# Altium footprint library Footprint-Lib-PhilsLab.PcbLib: 544 footprints (part 29 of 34)
Each footprint in its own frame and in the unit in brackets; x right, y up, seen from the top. Pads: shape width x height; smd on the part's side, far side on the other; paste and mask are expansions set on the pad; w line width, h text height; cw(c..) or ccw(c..) is an arc to the next point about the centre after c.
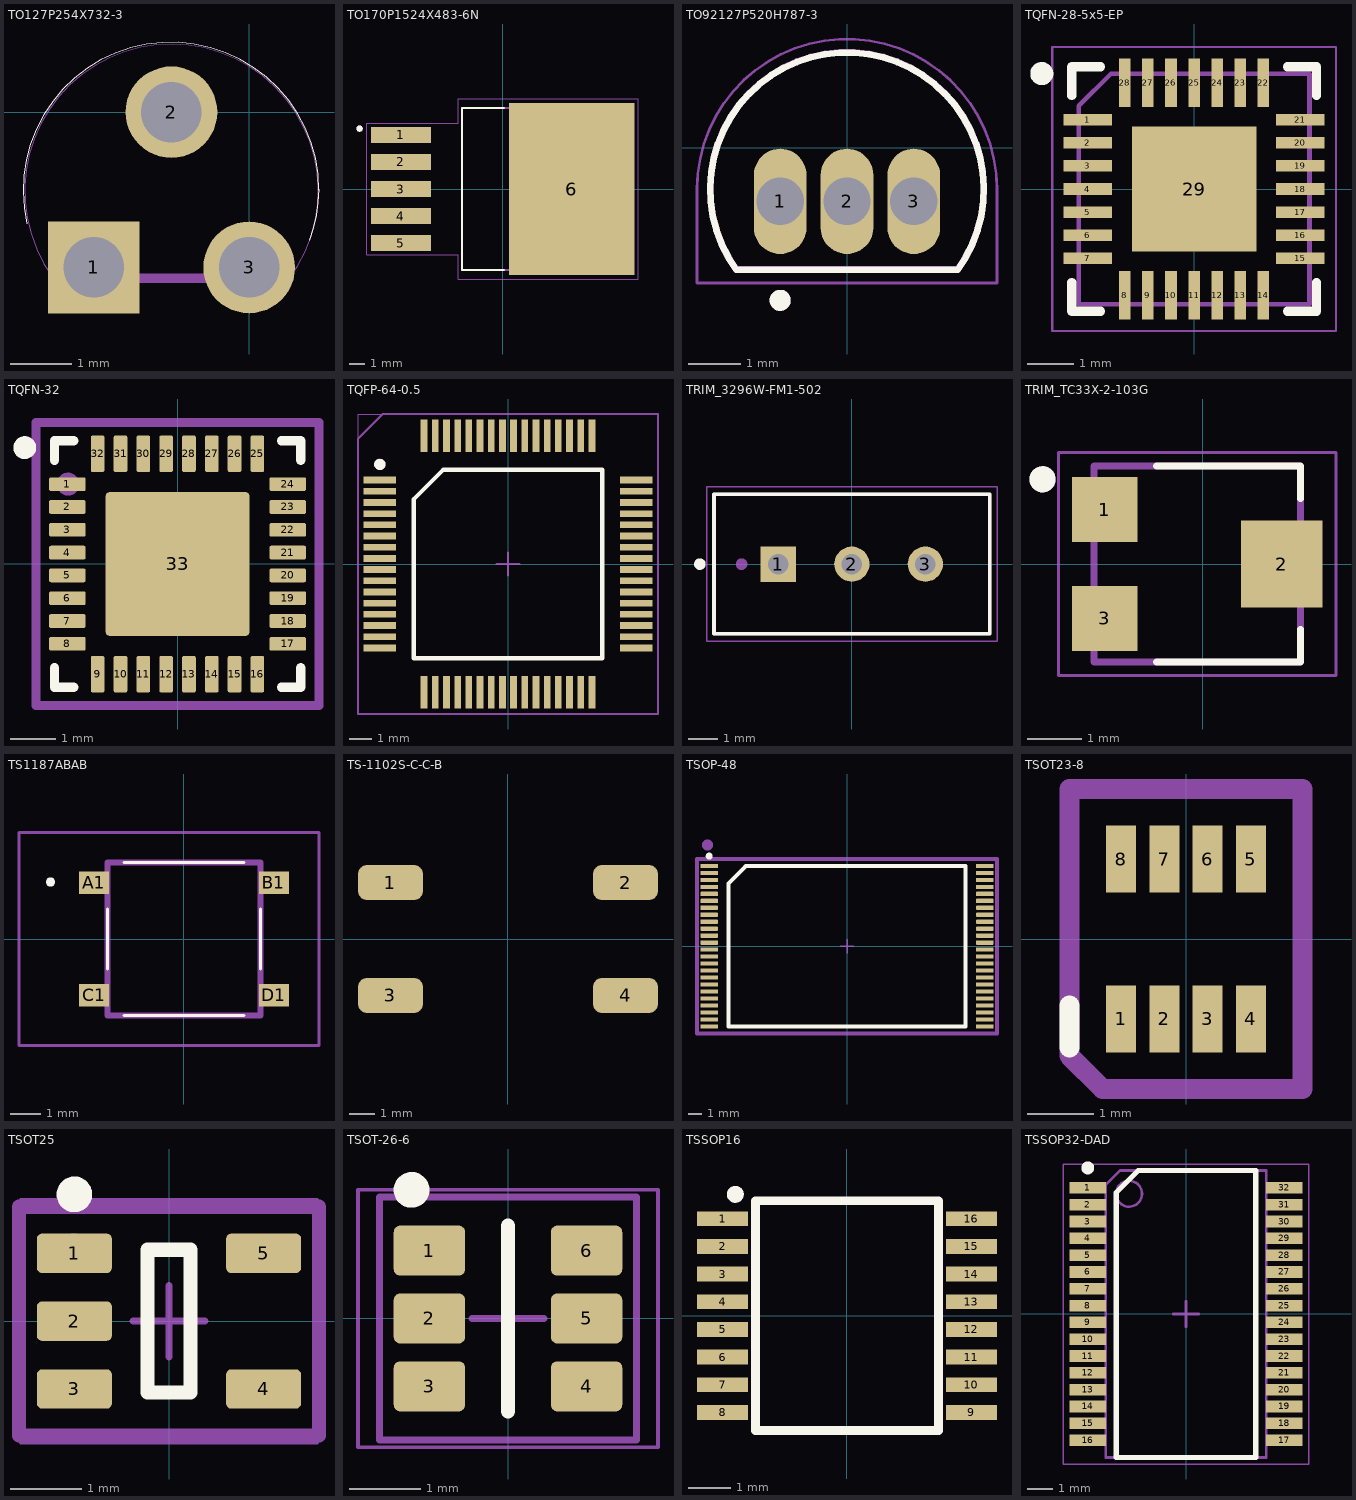
[diagram p28: the footprints below, top view; thin cyan lines are the x and y axes]

## TO127P254X732-3 [mil]
pads (3):
  rect 59x59 / inner round 59 / far side rect 59x59 hole 39: 1(-100,-100)
  round 59 hole 39: 2(-50,0) 3(0,-100)
Top Overlay:
  lines w0: -143.07,-71.72 cw(c-50.25,-50.29) 45,-50.29 ; 39.18,-82.52 ccw(c-51.58,-49.49) 45,-49.49
Mechanical 13:
  lines w0: -126.49,-106.33 cw(c-50,-50.76) 25.51,-107.66
  lines w6: -126,-107 26,-107
3D body "step_temp.STEP": height 181.1, standoff -492.13, extent -147.64,-129.92 68.11,11.81

## TO170P1524X483-6N [mm]
height 4.83
pads (6):
  rect 3.79x0.99 smd: 1(-6.4,3.4) 2(-6.4,1.7) 3(-6.4,0) 4(-6.4,-1.7) 5(-6.4,-3.4)
  rect 7.88x10.84 smd paste-6: 6(4.35,0)
Top Overlay:
  circle w0.2: c-9,3.8 r0.1
  lines w0.127: 0.09,-5.08 -2.553,-5.08 -2.553,5.08 0.09,5.08
Top Paste:
  region: 7.74,-5.15 6.22,-5.15 6.22,-3.9 7.74,-3.9
  region: 2.48,-5.15 0.96,-5.15 0.96,-3.9 2.48,-3.9
  region: 5.11,-5.15 3.59,-5.15 3.59,-3.9 5.11,-3.9
  region: 7.74,-3.34 6.22,-3.34 6.22,-2.09 7.74,-2.09
  region: 2.48,-3.34 0.96,-3.34 0.96,-2.09 2.48,-2.09
  region: 5.11,-3.34 3.59,-3.34 3.59,-2.09 5.11,-2.09
  region: 7.74,-1.53 6.22,-1.53 6.22,-0.28 7.74,-0.28
  region: 2.48,-1.53 0.96,-1.53 0.96,-0.28 2.48,-0.28
  region: 5.11,-1.53 3.59,-1.53 3.59,-0.28 5.11,-0.28
  region: 7.74,3.9 6.22,3.9 6.22,5.15 7.74,5.15
  region: 2.48,3.9 0.96,3.9 0.96,5.15 2.48,5.15
  region: 5.11,3.9 3.59,3.9 3.59,5.15 5.11,5.15
  region: 7.74,2.09 6.22,2.09 6.22,3.34 7.74,3.34
  region: 2.48,2.09 0.96,2.09 0.96,3.34 2.48,3.34
  region: 5.11,2.09 3.59,2.09 3.59,3.34 5.11,3.34
  region: 7.74,0.28 6.22,0.28 6.22,1.53 7.74,1.53
  region: 2.48,0.28 0.96,0.28 0.96,1.53 2.48,1.53
  region: 5.11,0.28 3.59,0.28 3.59,1.53 5.11,1.53
Mechanical 13:
  circle w0.2: c-9,3.8 r0.1
  lines w0.127: -2.553,-5.08 -2.553,5.08 6.368,5.08 6.368,-5.08 -2.553,-5.08
Mechanical 15:
  lines w0.05: -8.545,-4.145 -2.803,-4.145 -2.803,-5.67 8.54,-5.67 8.54,5.67 -2.803,5.67 -2.803,4.145 -8.545,4.145 -8.545,-4.145
3D body "step_temp.STEP": height 4.65, standoff -0.15, extent -7.175,-5.08 7.175,5.08

## TO92127P520H787-3 [mm]
height 7.87
pads (3):
  oval 1x2 hole 0.9: 1(-1.27,-1.02) 2(0,-1.02) 3(1.27,-1.02)
Top Overlay:
  circle w0.2: c-1.27,-2.9 r0.1
  lines w0.127: -2.103,-2.318 cw(c0,-0.79) 2.103,-2.318 ; -2.102,-2.32 2.102,-2.32
Mechanical 13:
  circle w0.2: c-1.27,-2.9 r0.1
  lines w0.127: -2.103,-2.313 cw(c0,-0.785) 2.103,-2.313 ; -2.102,-2.315 2.102,-2.315
Mechanical 15:
  lines w0.05: -2.85,-2.57 2.85,-2.57 2.85,-0.785 ccw(c0,-0.785) -2.85,-0.785 -2.85,-2.57
3D body "step_temp.STEP": height 7.74, standoff -1.66, extent -2.385,-2.282 2.413,1.651

## TQFN-28-5x5-EP [mm] "QFN, 28-Leads, Body 5.00x5.00mm, Pitch 0.50mm, Thermal Pad 2.70x2.70mm, IPC Medium Density"
height 0.8
pads (29):
  rect 1.05x0.25 smd mask+0.15: 1(-2.3,1.5) 2(-2.3,1) 3(-2.3,0.5) 4(-2.3,0) 5(-2.3,-0.5) 6(-2.3,-1) 7(-2.3,-1.5) 15(2.3,-1.5) 16(2.3,-1) 17(2.3,-0.5) 18(2.3,0) 19(2.3,0.5) 20(2.3,1) 21(2.3,1.5)
  rect 0.25x1.05 smd mask+0.15: 8(-1.5,-2.3) 9(-1,-2.3) 10(-0.5,-2.3) 11(0,-2.3) 12(0.5,-2.3) 13(1,-2.3) 14(1.5,-2.3) 22(1.5,2.3) 23(1,2.3) 24(0.5,2.3) 25(0,2.3) 26(-0.5,2.3) 27(-1,2.3) 28(-1.5,2.3)
  rect 2.7x2.7 smd paste+0 mask+0.05: 29(0,0)
Top Overlay:
  circle w0.25: c-3.3,2.5 r0.125
  lines w0.2: -2.65,-2.025 -2.65,-2.65 -2.025,-2.65 ; -2.65,2.025 -2.65,2.65 -2.025,2.65 ; 2.025,-2.65 2.65,-2.65 2.65,-2.025 ; 2.025,2.65 2.65,2.65 2.65,2.025
Mechanical 13:
  lines w0.1: -2.5,-2.5 -2.5,1.8 -1.8,2.5 2.5,2.5 2.5,-2.5 -2.5,-2.5
  text "'.Designator'" at -5.815,-0.9 h1
Mechanical 15:
  lines w0.05: -3.075,-3.075 3.075,-3.075 3.075,3.075 -3.075,3.075 -3.075,-3.075
  lines w0.1: -0.5,0 0.5,0 ; 0,-0.5 0,0.5
3D body "TQFN-28-5x5-EP.step": height 0.8, standoff 0, extent -2.55,-2.55 2.55,2.55

## TQFN-32 [mm]
height 0.8
pads (33):
  rrect25% 0.8x0.3 smd mask+0.04: 1(-2.415,1.75) 8(-2.415,-1.75) 17(2.415,-1.75) 24(2.415,1.75)
  rrect25% 0.8x0.3 smd mask+0.05: 2(-2.415,1.25) 3(-2.415,0.75) 4(-2.415,0.25) 5(-2.415,-0.25) 6(-2.415,-0.75) 7(-2.415,-1.25) 18(2.415,-1.25) 19(2.415,-0.75) 20(2.415,-0.25) 21(2.415,0.25) 22(2.415,0.75) 23(2.415,1.25)
  rrect25% 0.3x0.8 smd mask+0.04: 9(-1.75,-2.415) 16(1.75,-2.415) 25(1.75,2.415) 32(-1.75,2.415)
  rrect25% 0.3x0.8 smd mask+0.05: 10(-1.25,-2.415) 11(-0.75,-2.415) 12(-0.25,-2.415) 13(0.25,-2.415) 14(0.75,-2.415) 15(1.25,-2.415) 26(1.25,2.415) 27(0.75,2.415) 28(0.25,2.415) 29(-0.25,2.415) 30(-0.75,2.415) 31(-1.25,2.415)
  rrect5% 3.15x3.15 smd: 33(0,0)
Top Overlay:
  circle w0.25: c-3.35,2.55 r0.125
  lines w0.2: -2.7,-2.275 -2.7,-2.7 -2.275,-2.7 ; -2.7,2.275 -2.7,2.7 -2.275,2.7 ; 2.275,-2.7 2.7,-2.7 2.7,-2.275 ; 2.275,2.7 2.7,2.7 2.7,2.275
Mechanical 13:
  circle w0.3: c-2.4,1.75 r0.1
  lines w0.2: -3.1,-3.1 3.1,-3.1 3.1,3.1 -3.1,3.1 -3.1,-3.1
  text "'.Designator'" at -5.665,-0.417 h1
Mechanical 15:
  lines w0.05: -3.1,-3.1 3.1,-3.1 3.1,3.1 -3.1,3.1 -3.1,-3.1
  lines w0.1: -0.5,0 0.5,0 ; 0,-0.5 0,0.5
3D body "TQFN-32.step": height 0.8, standoff 0, extent -2.551,-2.551 2.551,2.551

## TQFP-64-0.5 [mm] "TSQFP, 64-Leads, Body 10,00x10,00mm, Pitch 0,50mm, IPC Medium Density"
height 1.6
pads (64):
  rect 1.45x0.3 smd: 1(-5.725,3.75) 2(-5.725,3.25) 3(-5.725,2.75) 4(-5.725,2.25) 5(-5.725,1.75) 6(-5.725,1.25) 7(-5.725,0.75) 8(-5.725,0.25) 9(-5.725,-0.25) 10(-5.725,-0.75) 11(-5.725,-1.25) 12(-5.725,-1.75) 13(-5.725,-2.25) 14(-5.725,-2.75) 15(-5.725,-3.25) 16(-5.725,-3.75) 33(5.725,-3.75) 34(5.725,-3.25) 35(5.725,-2.75) 36(5.725,-2.25) 37(5.725,-1.75) 38(5.725,-1.25) 39(5.725,-0.75) 40(5.725,-0.25) 41(5.725,0.25) 42(5.725,0.75) 43(5.725,1.25) 44(5.725,1.75) 45(5.725,2.25) 46(5.725,2.75) 47(5.725,3.25) 48(5.725,3.75)
  rect 0.3x1.45 smd: 17(-3.75,-5.725) 18(-3.25,-5.725) 19(-2.75,-5.725) 20(-2.25,-5.725) 21(-1.75,-5.725) 22(-1.25,-5.725) 23(-0.75,-5.725) 24(-0.25,-5.725) 25(0.25,-5.725) 26(0.75,-5.725) 27(1.25,-5.725) 28(1.75,-5.725) 29(2.25,-5.725) 30(2.75,-5.725) 31(3.25,-5.725) 32(3.75,-5.725) 49(3.75,5.725) 50(3.25,5.725) 51(2.75,5.725) 52(2.25,5.725) 53(1.75,5.725) 54(1.25,5.725) 55(0.75,5.725) 56(0.25,5.725) 57(-0.25,5.725) 58(-0.75,5.725) 59(-1.25,5.725) 60(-1.75,5.725) 61(-2.25,5.725) 62(-2.75,5.725) 63(-3.25,5.725) 64(-3.75,5.725)
Top Overlay:
  circle w0.25: c-5.725,4.45 r0.125
  lines w0.2: -4.2,-4.2 -4.2,2.9 -2.9,4.2 4.2,4.2 4.2,-4.2 -4.2,-4.2
Mechanical 13:
  circle w0.1: c-5.724,4.454 r0.2
  lines w0.1: -6.7,-6.7 -6.7,5.6 -5.6,6.7 6.7,6.7 6.7,-6.7 -6.7,-6.7
  text "'.Designator'" at -5.815,-0.9 h1
Mechanical 15:
  lines w0.05: -6.7,-6.7 -6.7,6.7 6.7,6.7 6.7,-6.7 -6.7,-6.7
  lines w0.1: -0.5,0 0.5,0 ; 0,-0.5 0,0.5
3D body "TQFP-64-0.5.step": height 1.6, standoff 0, extent -6,-6 6,6

## TRIM_3296W-FM1-502 [mm]
pads (3):
  rect 1.218x1.218 hole 0.71: 1(-2.54,0)
  round 1.218 hole 0.71: 2(0,0) 3(2.54,0)
Top Overlay:
  circle w0.2: c-5.25,0 r0.1
  lines w0.127: -4.765,-2.41 4.765,-2.41 4.765,2.42 -4.765,2.42 -4.765,-2.41
Mechanical 13:
  circle w0.2: c-3.81,0 r0.1
  lines w0.127: -4.765,-2.41 -4.765,2.42 4.765,2.42 4.765,-2.41 -4.765,-2.41
Mechanical 15:
  lines w0.05: -5.015,-2.66 -5.015,2.67 5.015,2.67 5.015,-2.66 -5.015,-2.66
3D body "3296W-FM1-502.STEP": height 11.55, standoff -7.72, extent -4.765,-2.41 4.765,2.42

## TRIM_TC33X-2-103G [mm]
pads (3):
  rect 1.2x1.2 smd: 1(-1.8,1) 3(-1.8,-1)
  rect 1.5x1.6 smd: 2(1.45,0)
Top Overlay:
  circle w0.24: c-2.946,1.558 r0.12
  lines w0.127: -0.85,-1.8 1.8,-1.8 1.8,-1.2 ; -0.85,1.8 1.8,1.8 1.8,1.2
Mechanical 13:
  circle w0.24: c-2.946,1.558 r0.12
  lines w0.127: -2,-1.8 1.8,-1.8 1.8,1.8 -2,1.8 -2,-1.8
Mechanical 15:
  lines w0.05: -2.65,-2.05 2.45,-2.05 2.45,2.05 -2.65,2.05 -2.65,-2.05
3D body "step_temp.STEP": height 1.1, standoff -0.1, extent -1.5,-1.9 1.5,1.9

## TS1187ABAB [mm]
pads (4):
  rect 1x0.75 smd: A1(-3,1.875) B1(3,1.875) C1(-3,-1.875) D1(3,-1.875)
Top Overlay:
  lines w0.1: -2.55,-1 -2.55,1 ; -2,-2.55 2,-2.55 ; -2,2.55 2,2.55 ; 2.55,-1 2.55,1
  lines w0.2: -4.5,1.9 ccw(c-4.45,1.9) -4.4,1.9 ; -4.5,1.9 cw(c-4.45,1.9) -4.4,1.9 ; -4.5,1.9 ccw(c-4.45,1.9) -4.4,1.9
Mechanical 13:
  lines w0.2: -2.55,-2.55 2.55,-2.55 2.55,2.55 -2.55,2.55 -2.55,-2.55
Mechanical 15:
  lines w0.1: -5.5,-3.55 4.5,-3.55 4.5,3.55 -5.5,3.55 -5.5,-3.55
3D body "TS-1187A-B-A-B.stp": height 1.5, standoff 0, extent -3.2,-2.55 3.3,2.55

## TS-1102S-C-C-B [mm] "None Without bracket 50mA 6mm 300,000 times 260gf 12V 6mm 5mm Round Button Standing paste SPST SMD Tactile Switches ROHS"
pads (4):
  rrect50% 2.6x1.4 smd: 1(-4.705,2.26) 2(4.705,2.26) 3(-4.705,-2.26) 4(4.705,-2.26)
3D body "2-1437565-7.step": height 4.28, standoff -0.1, extent -5.02,-3 4.98,3

## TSOP-48 [mm]
height 1.2
pads (48):
  rrect25% 1.25x0.3 smd mask+0.12: 1(-9.875,5.75) 2(-9.875,5.25) 3(-9.875,4.75) 4(-9.875,4.25) 5(-9.875,3.75) 6(-9.875,3.25) 7(-9.875,2.75) 8(-9.875,2.25) 9(-9.875,1.75) 10(-9.875,1.25) 11(-9.875,0.75) 12(-9.875,0.25) 13(-9.875,-0.25) 14(-9.875,-0.75) 15(-9.875,-1.25) 16(-9.875,-1.75) 17(-9.875,-2.25) 18(-9.875,-2.75) 19(-9.875,-3.25) 20(-9.875,-3.75) 21(-9.875,-4.25) 22(-9.875,-4.75) 23(-9.875,-5.25) 24(-9.875,-5.75) 25(9.875,-5.75) 26(9.875,-5.25) 27(9.875,-4.75) 28(9.875,-4.25) 29(9.875,-3.75) 30(9.875,-3.25) 31(9.875,-2.75) 32(9.875,-2.25) 33(9.875,-1.75) 34(9.875,-1.25) 35(9.875,-0.75) 36(9.875,-0.25) 37(9.875,0.25) 38(9.875,0.75) 39(9.875,1.25) 40(9.875,1.75) 41(9.875,2.25) 42(9.875,2.75) 43(9.875,3.25) 44(9.875,3.75) 45(9.875,4.25) 46(9.875,4.75) 47(9.875,5.25) 48(9.875,5.75)
Top Overlay:
  circle w0.25: c-9.875,6.45 r0.125
  lines w0.3: -8.5,-5.75 8.5,-5.75 8.5,5.75 -7.25,5.75 -8.5,4.5 -8.5,-5.75
Mechanical 13:
  circle w0.5: c-10,7.25 r0.15
  lines w0.3: -10.75,-6.25 10.75,-6.25 10.75,6.25 -10.75,6.25 -10.75,-6.25
  text "'.Designator'" at -5.815,-0.9 h1
Mechanical 15:
  lines w0.05: -10.725,-6.3 10.725,-6.3 10.725,6.3 -10.725,6.3 -10.725,-6.3
  lines w0.1: -0.5,0 0.5,0 ; 0,-0.5 0,0.5
3D body "TSOP-48.step": height 1.2, standoff 0, extent -10,-6.05 10,6.05

## TSOT23-8 [mm]
pads (8):
  rect 0.45x1 smd: 1(-0.975,-1.2) 2(-0.325,-1.2) 3(0.325,-1.2) 4(0.975,-1.2) 5(0.975,1.2) 6(0.325,1.2) 7(-0.325,1.2) 8(-0.975,1.2)
Top Overlay:
  lines w0.3: -1.75,-1.628 -1.75,-1
Mechanical 13:
  lines w0.3: -1.75,-1.75 -1.25,-2.25 1.75,-2.25 1.75,2.25 -1.75,2.25 -1.75,0 -1.75,-1.75
  text "'.Designator'" at -5.84,-0.925 h1
3D body "TSOT-23-8.STEP": height 1.01, standoff 0.01, extent -1.45,-1.4 1.45,1.4

## TSOT25 [mm] "SOT23, 5-Leads, Body 2.90x2.80mm, Pitch 0.95mm, IPC Medium Density"
height 1
pads (5):
  rrect25% 1.05x0.55 smd: 1(-1.325,0.95) 2(-1.325,0) 3(-1.325,-0.95) 4(1.325,-0.95) 5(1.325,0.95)
Top Overlay:
  circle w0.25: c-1.325,1.775 r0.125
  lines w0.2: -0.3,-1 0.3,-1 0.3,1 -0.3,1 -0.3,-1
Mechanical 13:
  circle w0.25: c-1.325,0.975 r0.125
  lines w0.2: -2.1,-1.6 2.1,-1.6 2.1,1.6 -2.1,1.6 -2.1,-1.6
  text "'.Designator'" at -5.815,-0.9 h1
Mechanical 15:
  lines w0.05: -2.075,-1.7 -2.075,1.7 2.075,1.7 2.075,-1.7 -2.075,-1.7
  lines w0.1: -0.5,0 0.5,0 ; 0,-0.5 0,0.5
3D body "TSOT25.step": height 1, standoff 0, extent -1.4,-1.45 1.4,1.45

## TSOT-26-6 [mm] "TSOP, 6-Leads, Body 2.90x1.60mm, Pitch 0.95mm, IPC Medium Density"
height 1
pads (6):
  rrect25% 1x0.7 smd: 1(-1.1,0.95) 2(-1.1,0) 3(-1.1,-0.95) 4(1.1,-0.95) 5(1.1,0) 6(1.1,0.95)
Top Overlay:
  circle w0.25: c-1.35,1.8 r0.125
  lines w0.2: 0,-1.3 0,1.3
Mechanical 13:
  lines w0.1: -1.8,-1.7 -1.8,1.7 1.8,1.7 1.8,-1.7 -1.8,-1.7
  text ".Designator" at -4.998,-0.333 h1
Mechanical 15:
  lines w0.05: -2.1,-1.8 -2.1,1.8 2.1,1.8 2.1,-1.8 -2.1,-1.8
  lines w0.1: -0.5,0 0.5,0 ; 0,-0.5 0,0.5
3D body "TSOT-26-6.step": height 1, standoff 0, extent -1.4,-1.55 1.4,1.55

## TSSOP16 [mm]
pads (16):
  rect 1.2x0.35 smd: 1(-2.925,2.275) 2(-2.925,1.625) 3(-2.925,0.975) 4(-2.925,0.325) 5(-2.925,-0.325) 6(-2.925,-0.975) 7(-2.925,-1.625) 8(-2.925,-2.275) 9(2.925,-2.275) 10(2.925,-1.625) 11(2.925,-0.975) 12(2.925,-0.325) 13(2.925,0.325) 14(2.925,0.975) 15(2.925,1.625) 16(2.925,2.275)
Top Overlay:
  circle w0.2: c-2.625,2.85 r0.1
  lines w0.203: -2.15,-2.7 -2.15,2.7 2.15,2.7 2.15,-2.7 -2.15,-2.7

## TSSOP32-DAD [mm] "TSOP, 32-Leads, Body 11.00x6.10mm, Pitch 0.65mm, IPC Medium Density"
height 1.15
pads (32):
  rect 1.4x0.45 smd: 1(-3.8,4.875) 2(-3.8,4.225) 3(-3.8,3.575) 4(-3.8,2.925) 5(-3.8,2.275) 6(-3.8,1.625) 7(-3.8,0.975) 8(-3.8,0.325) 9(-3.8,-0.325) 10(-3.8,-0.975) 11(-3.8,-1.625) 12(-3.8,-2.275) 13(-3.8,-2.925) 14(-3.8,-3.575) 15(-3.8,-4.225) 16(-3.8,-4.875) 17(3.8,-4.875) 18(3.8,-4.225) 19(3.8,-3.575) 20(3.8,-2.925) 21(3.8,-2.275) 22(3.8,-1.625) 23(3.8,-0.975) 24(3.8,-0.325) 25(3.8,0.325) 26(3.8,0.975) 27(3.8,1.625) 28(3.8,2.275) 29(3.8,2.925) 30(3.8,3.575) 31(3.8,4.225) 32(3.8,4.875)
Top Overlay:
  circle w0.25: c-3.8,5.65 r0.125
  lines w0.2: -2.7,-5.55 2.7,-5.55 2.7,5.55 -1.85,5.55 -2.7,4.7 -2.7,-5.55
Mechanical 13:
  circle w0.1: c-2.2,4.65 r0.5
  lines w0.1: -3.1,-5.55 -3.1,5 -2.55,5.55 3.1,5.55 3.1,-5.55 -3.1,-5.55
  text "'.Designator'" at -6.315,-1.4 h1
Mechanical 15:
  lines w0.05: -4.75,-5.8 -4.75,5.8 4.75,5.8 4.75,-5.8 -4.75,-5.8
  lines w0.1: -0.5,0 0.5,0 ; 0,-0.5 0,0.5
3D body "TSSOP32-DAD.step": height 1.15, standoff 0, extent -4.05,-5.55 4.05,5.55